# Altium schematic symbol library KDV06FR100ET.SchLib: 1 symbol
Pins are listed as number, name and electrical type; pins without a type are passive.

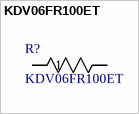
[diagram p0: symbol KDV06FR100ET]

## KDV06FR100ET
designator R?
No Description Available; Manufacturer_Name: Ohmite; Copyright: Copyright (C) 2026 Ultra Librarian. All rights reserved.; Manufacturer_Part_Number: KDV06FR100ET
footprint RES_KDV06_OHM
pins: 1, 2